# Altium footprint library 10x10L.PcbLib: 1 footprints
Each footprint in its own frame and in the unit in brackets; x right, y up, seen from the top. Pads: shape width x height; smd on the part's side, far side on the other; paste and mask are expansions set on the pad; w line width, h text height; cw(c..) or ccw(c..) is an arc to the next point about the centre after c.
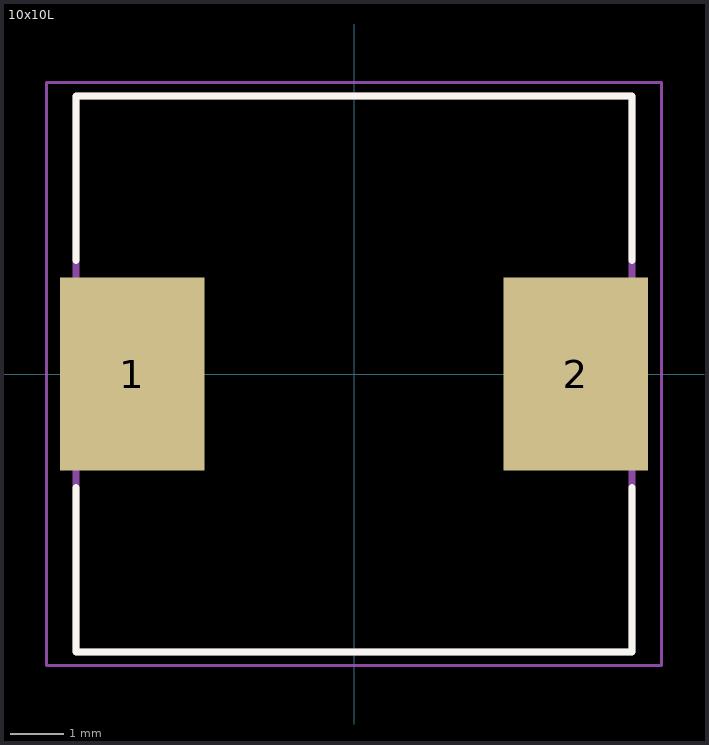
[diagram p0: the footprint, top view; thin cyan lines are the x and y axes]

## 10x10L [mm]
height 4.8
pads (2):
  rect 2.7x3.6 smd: 1(-4.15,0) 2(4.15,0)
Top Overlay:
  lines w0.127: -5.2,-2.12 -5.2,-5.2 5.2,-5.2 5.2,-2.12 ; -5.2,2.12 -5.2,5.2 5.2,5.2 5.2,2.12
Mechanical 13:
  lines w0.127: -5.2,-5.2 -5.2,5.2 5.2,5.2 5.2,-5.2 -5.2,-5.2
Mechanical 15:
  lines w0.05: -5.75,-5.45 -5.75,5.45 5.75,5.45 5.75,-5.45 -5.75,-5.45
3D body "step_temp.STEP": height 4.8, standoff 0, extent -5.2,-5.2 5.2,5.2